# Altium schematic symbol library 6130XX11121_61300211121.SchLib: 1 symbol
Pins are listed as number, name and electrical type; pins without a type are passive.

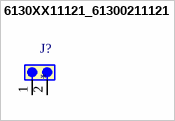
[diagram p0: symbol 6130XX11121_61300211121]

## 6130XX11121_61300211121
designator J?
MF: {'manufacturer': u'Wurth Electronics'}; MP: 61300211121; Package: None; Price: None; Value: *; Availability: Unavailable; ComponentLink1Description: Digikey link; ComponentLink1URL: https://www.digikey.com/en/products/detail/w%C3%BCrth-elektronik/61300211121/4846823
footprint 61300211121
footprint 61300211121 (Pin Header, pitch 2.54 mm, THT, Vertical, single row, 2p)
pins: 1, 2